# Altium schematic symbol library 3010Inductor.SchLib: 1 symbol
Pins are listed as number, name and electrical type; pins without a type are passive.

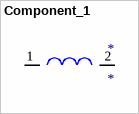
[diagram p0: symbol Component_1]

## Component_1
designator *
footprint XFL3010 SERIES (Coilcraft Shielded Power Inductors)
pins: 1, 2